# Altium schematic symbol library BIBLIOTECA DE ESQUEMA.SchLib: 404 symbols (part 2 of 2)
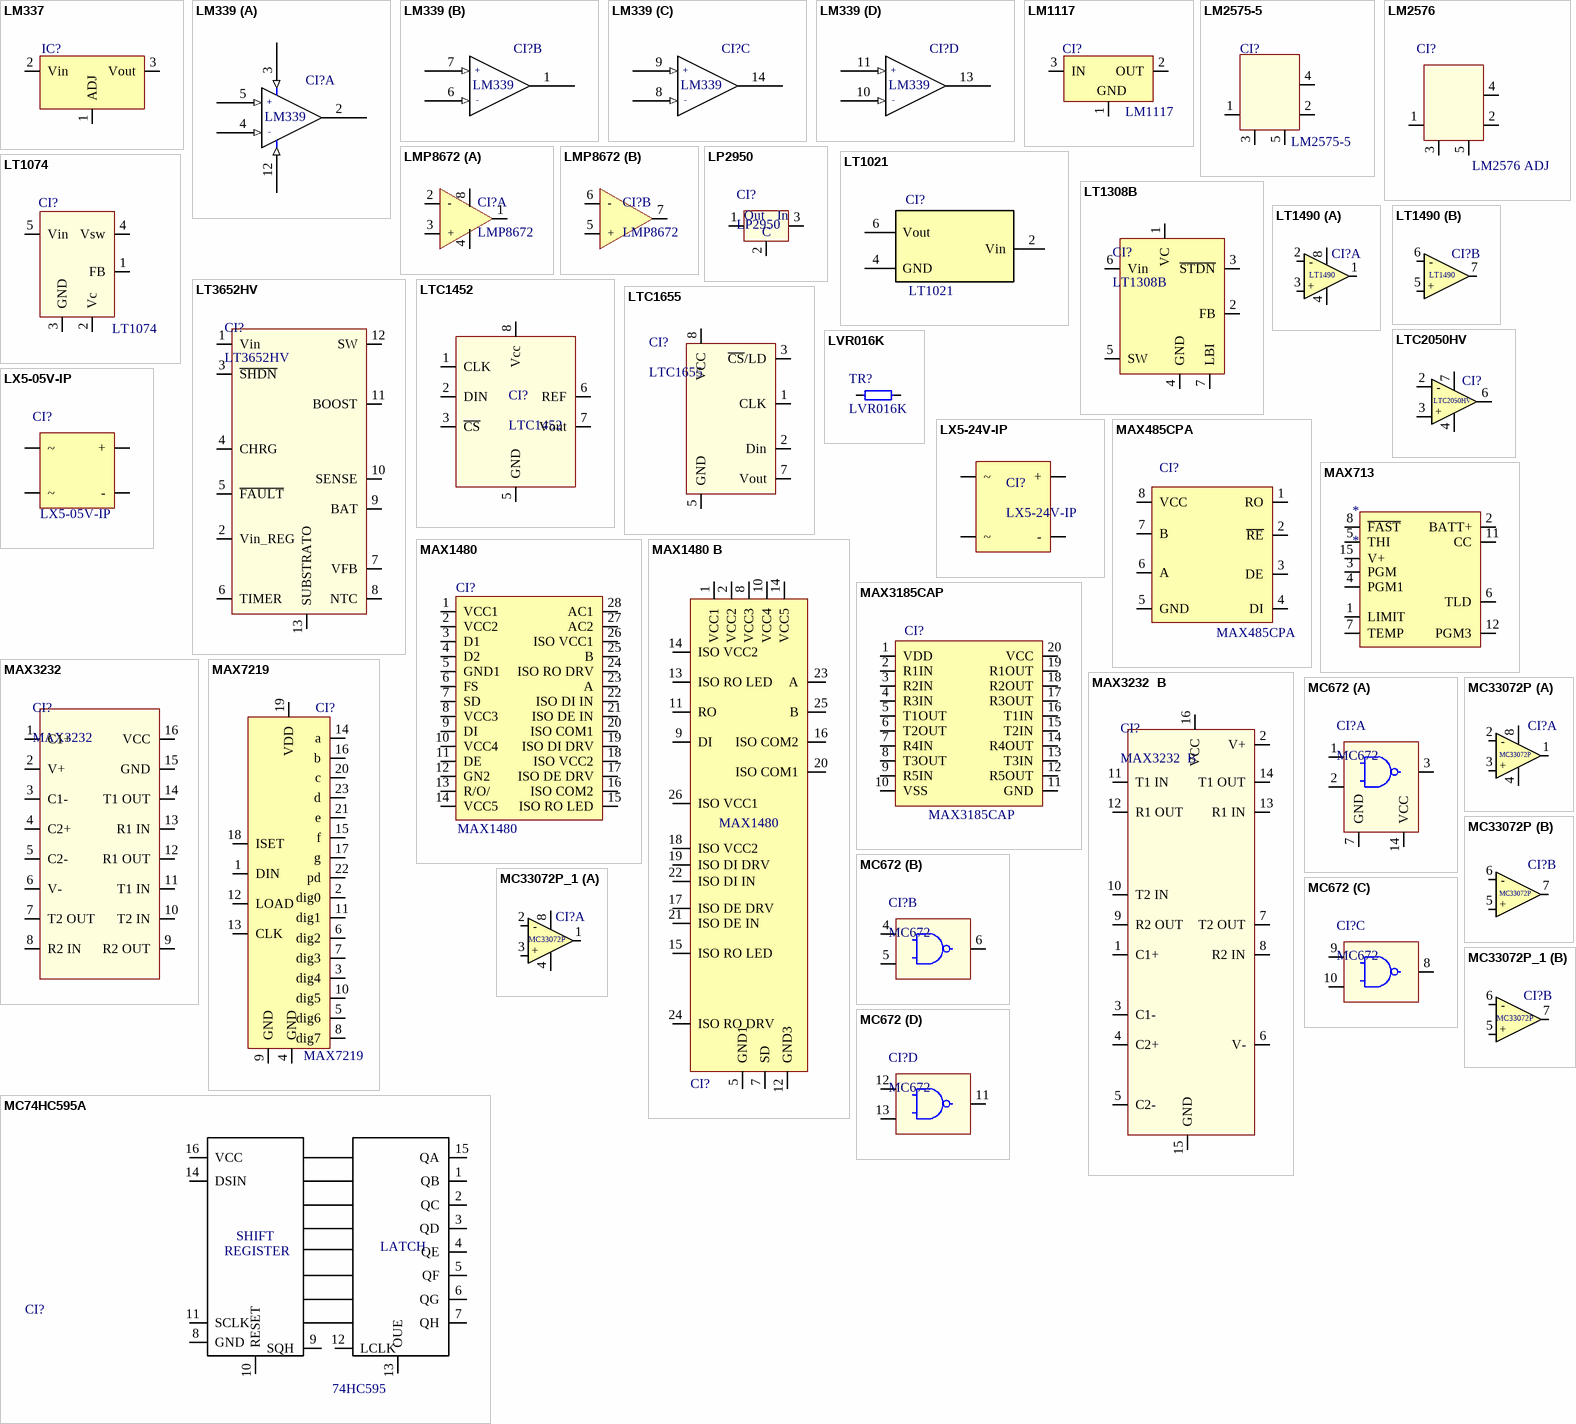
[diagram p22: symbols LM337 to MC33072P_1]

## MAX7219
designator CI?
Driver Display
pins: 1 DIN, 2 dig0, 3 dig4, 4 GND, 5 dig6, 6 dig2, 7 dig3, 8 dig7, 9 GND, 10 dig5, 11 dig1, 12 LOAD, 13 CLK, 14 a, 15 f, 16 b, 17 g, 18 ISET, 19 VDD, 20 c, 21 e, 22 pd, 23 d

## MC74HC595A
designator CI?, comment 74HC595
SHIFTER PARALLEL-OUTPUT
pins: 1 QB, 2 QC, 3 QD, 4 QE, 5 QF, 6 QG, 7 QH, 8 GND, 9 SQH, 10 RESET, 11 SCLK, 12 LCLK, 13 OUE, 14 DSIN, 15 QA, 16 VCC
text: SHIFT; LATCH; REGISTER

## MC672
designator CI?
Porta Nand
footprint DIP14
part A pins: 1, 2, 3, 7 GND, 14 VCC
part B pins: 4, 5, 6
part C pins: 8, 9, 10
part D pins: 11, 12, 13

## MC33072P
designator CI?
AMPLIFICADOR OPERACIONAL
footprint DIP8
footprint SOIC 8
part A pins: 1, 2, 3, 4, 8
part B pins: 5, 6, 7
part A text: -; +
part B text: -; +

## MC33072P_1
designator CI?, comment MC33072P
AMPLIFICADOR OPERACIONAL
footprint DIP8
footprint SOIC 8
part A pins: 1, 2, 3, 4, 8
part B pins: 5, 6, 7
part A text: -; +
part B text: -; +

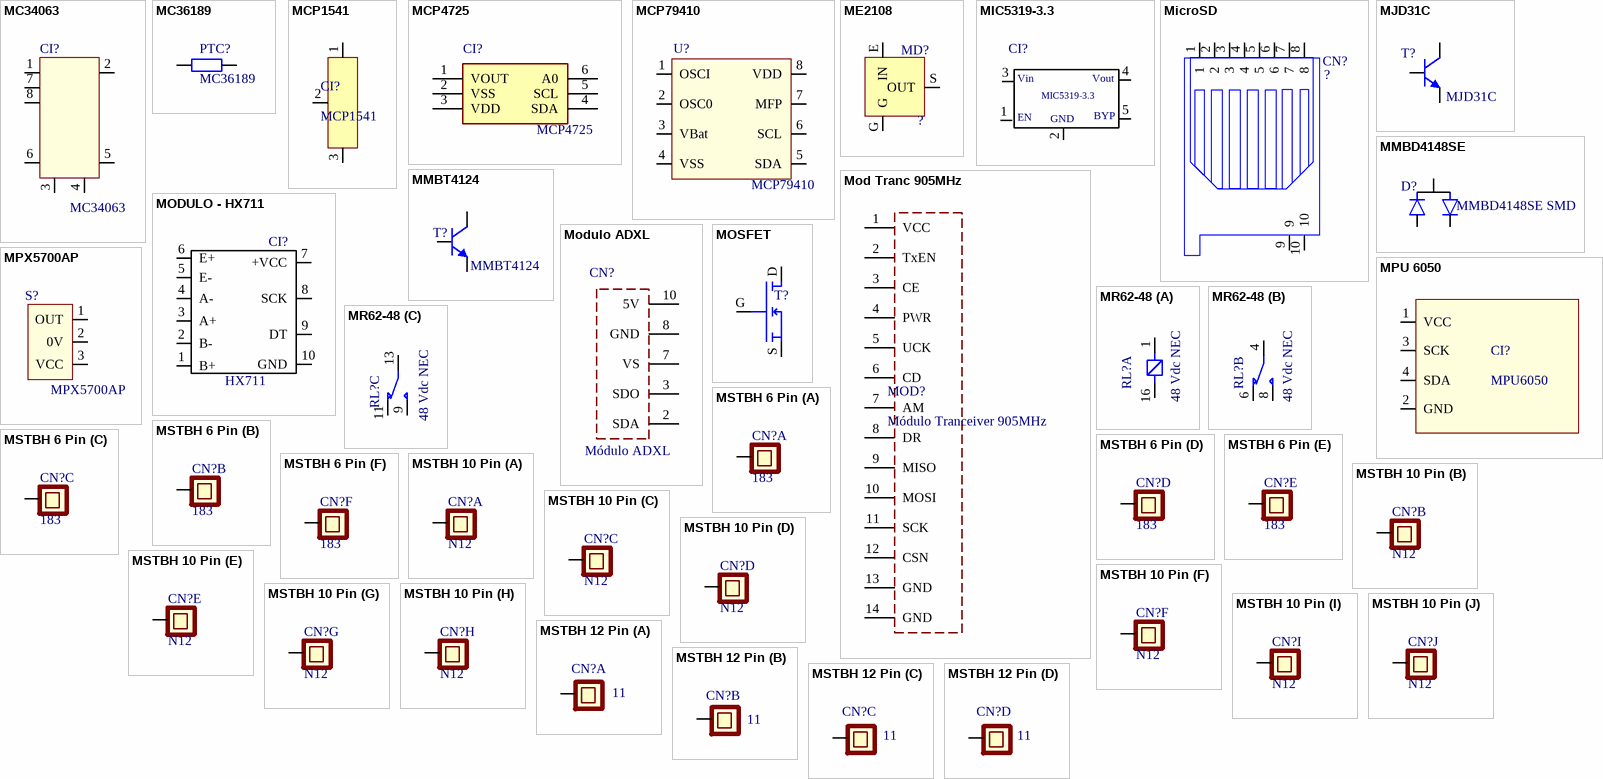
[diagram p16: symbols MC34063 to MSTBH 12 Pin]

## MC34063
designator CI?
Regulador de Tensão Chaveado
footprint DIP8
pins: 1, 2, 3, 4, 5, 6, 7, 8

## MC36189
designator PTC?
FUSÍVEL; Modelo: MC36189
footprint PTC 5.08mm 8mmD
pins: 1, 2

## MCP1541
designator CI?
Fonte de referência de precisão
pins: 1, 2, 3

## MCP4725
designator CI?
pins: 1 VOUT, 2 VSS, 3 VDD, 4 SDA, 5 SCL, 6 A0

## MCP79410
designator U?
Battery-Backed I2C
footprint MSOP-8
pins: 1 OSCI, 2 OSC0, 3 VBat, 4 VSS, 5 SDA, 6 SCL, 7 MFP, 8 VDD

## ME2108
designator MD?, comment ?
Conversor Boost
footprint BoostConverter
pins: E IN, G, S OUT

## MIC5319-3.3
designator CI?
footprint SOT-23 - 5
pins: 1, 2, 3, 4, 5
text: Vin; Vout; BYP; EN; GND

## MicroSD
designator CN?, comment ?
Conector MicroSD
pins: 1, 2, 3, 4, 5, 6, 7, 8, 9, 10

## MJD31C
designator T?
TRANSISTOR NPN; Modelo: PTH; ENCAP: TO-252
footprint TO-252 ( TRAN DPAK)
pins: B, C, E

## MMBD4148SE
designator D?, comment MMBD4148SE SMD
DIODO DE SILICIO; Modelo: MMBD4148SE SMD
footprint SOT-23 (1N4148SMD/MMBD4148-TP/1N4148 SE)
pins: 1, 2, 3

## MMBT4124
designator T?
TRANSISTOR NPN; Modelo: PTH
footprint SOT-23 MMBT
pins: B, C, E

## Mod Tranc 905MHz
designator MOD?, comment Módulo Tranceiver 905MHz
Módulo WIFI Tranceiver 905MHz + Barra de 14 pinos Femea
footprint Mod.Tran905MHz
pins: 1 VCC, 2 TxEN, 3 CE, 4 PWR, 5 UCK, 6 CD, 7 AM, 8 DR, 9 MISO, 10 MOSI, 11 SCK, 12 CSN, 13 GND, 14 GND

## MODULO - HX711
designator CI?, comment HX711
footprint MODULO - HX711
pins: 1 B+, 2 B-, 3 A+, 4 A-, 5 E-, 6 E+, 7 +VCC, 8 SCK, 9 DT, 10 GND

## Modulo ADXL
designator CN?, comment Módulo ADXL
Acelerômetro ADXL 345
pins: 2 SDA, 3 SDO, 7 VS, 8 GND, 10 5V

## MOSFET
designator T?
MOSFET
pins: D, G, S

## MPU 6050
designator CI?, comment MPU6050
Acelererômetro digital MPU6050
footprint MPU 6050
pins: 1 VCC, 2 GND, 3 SCK, 4 SDA

## MPX5700AP
designator S?
SENSOR DE PRESSÃO
pins: 1 OUT, 2 0V, 3 VCC

## MR62-48
designator RL?, comment 48 Vdc NEC
RELÉ
footprint AZ820-2C-48DE
part A pins: 1 B1, 16 B2
part B pins: 4 C1, 6 C3, 8 C2
part C pins: 9 C2, 11 C3, 13 C1

## MSTBH 6 Pin
designator CN?, comment 183
CONECTOR
footprint CONE MSTBH 2,5/ 6 GF
part A pins: 1
part B pins: 2
part C pins: 3
part D pins: 4
part E pins: 5
part F pins: 6

## MSTBH 10 Pin
designator CN?, comment N12
CONECTOR
footprint CONE MSTBH 2,5/ 10 GF
part A pins: 1
part B pins: 2
part C pins: 3
part D pins: 4
part E pins: 5
part F pins: 6
part G pins: 7
part H pins: 8
part I pins: 9
part J pins: 10

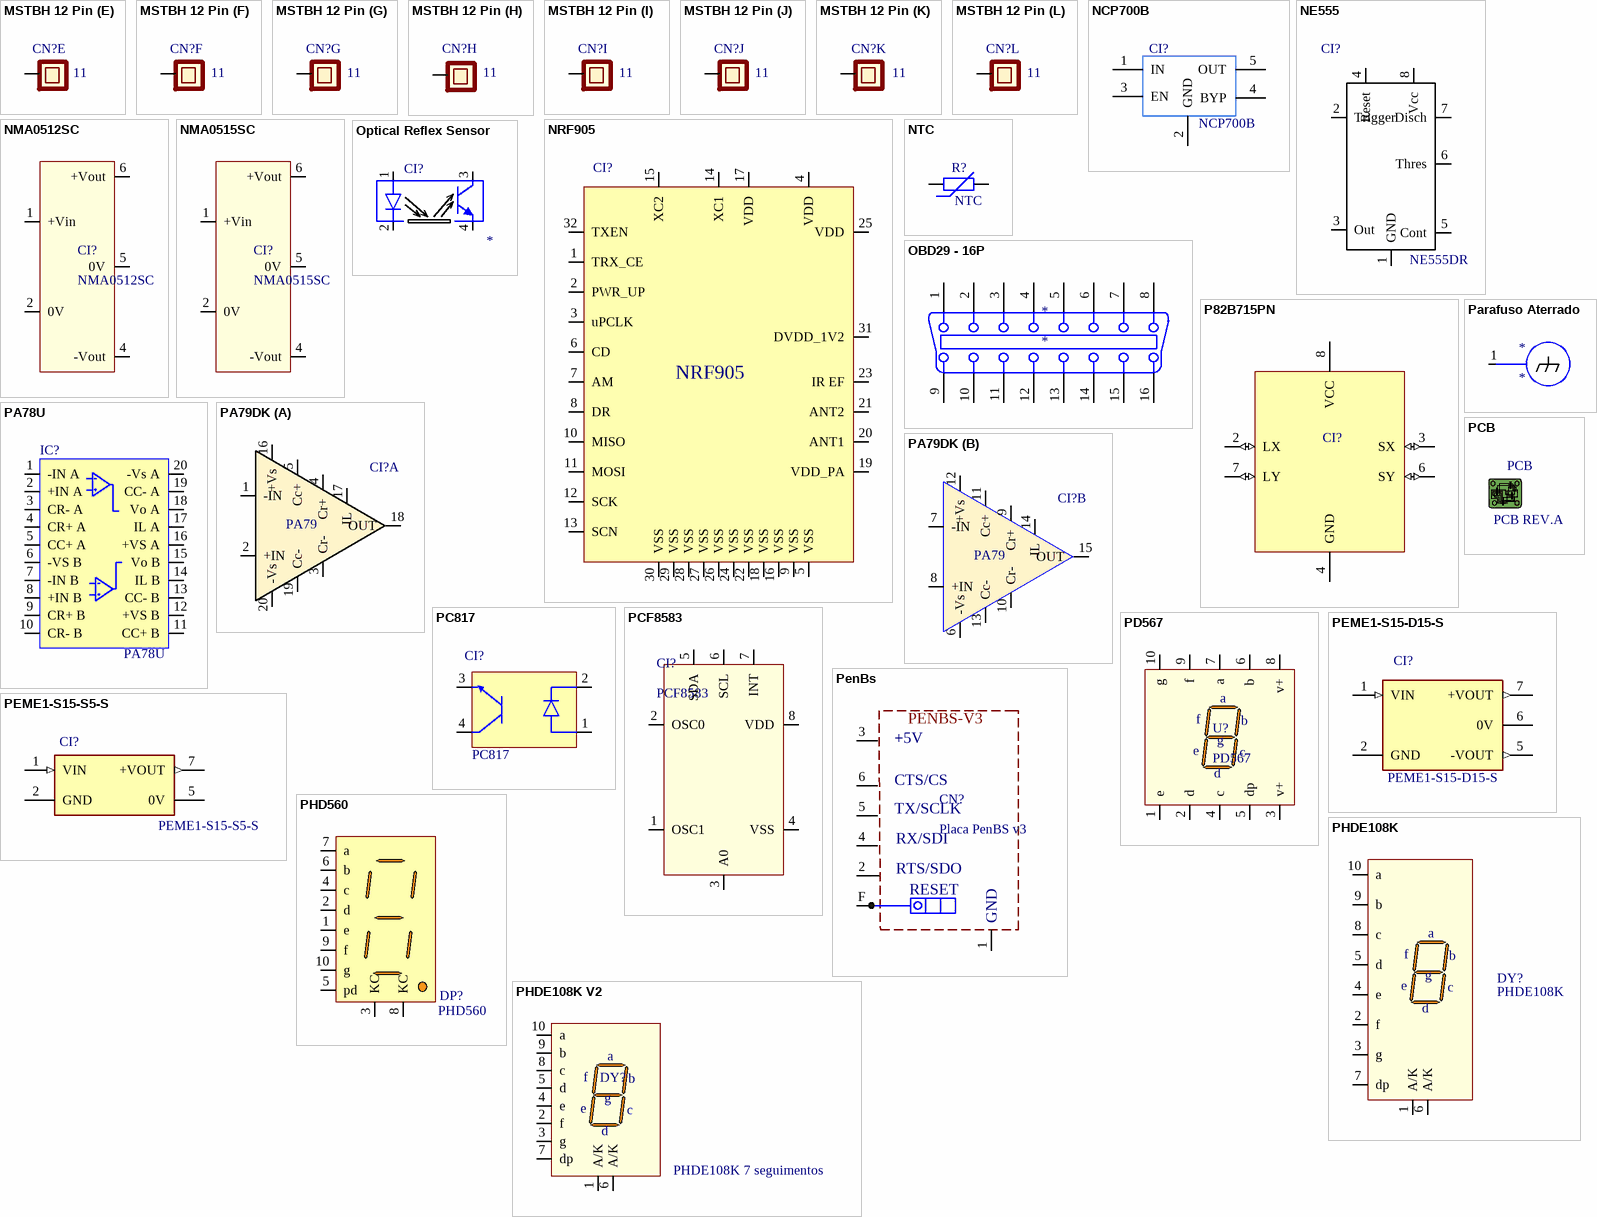
[diagram p17: symbols MSTBH 12 Pin to PHDE108K V2]

## MSTBH 12 Pin
designator CN?, comment 11
CONECTOR
footprint CONE MSTBH 2,5/ 12 GF
part A pins: 1
part B pins: 2
part C pins: 3
part D pins: 4
part E pins: 5
part F pins: 6
part G pins: 7
part H pins: 8
part I pins: 9
part J pins: 10
part K pins: 11
part L pins: 12

## NCP700B
designator CI?
footprint ncp700B
pins: 1 IN, 2 GND, 3 EN, 4 BYP, 5 OUT

## NE555
designator CI?, comment NE555DR
footprint SOIC 8
pins: 1 GND, 2 Trigger, 3 Out, 4 Reset, 5 Cont, 6 Thres, 7 Disch, 8 Vcc

## NMA0512SC
designator CI?
Conversor DC/DC
footprint NMAXXXXSC
pins: 1 +Vin, 2 0V, 4 -Vout, 5 0V, 6 +Vout

## NMA0515SC
designator CI?
Conversor DC/DC
footprint NMA0515SC
pins: 1 +Vin, 2 0V, 4 -Vout, 5 0V, 6 +Vout

## NRF905
designator CI?
TRANSCEPTOR; Modelo: NRF905
footprint QFN32 5X5
pins: 1 TRX_CE, 2 PWR_UP, 3 uPCLK, 4 VDD, 5 VSS, 6 CD, 7 AM, 8 DR, 9 VSS, 10 MISO, 11 MOSI, 12 SCK, 13 SCN, 14 XC1, 15 XC2, 16 VSS, 17 VDD, 18 VSS, 19 VDD_PA, 20 ANT1, 21 ANT2, 22 VSS, 23 IR EF, 24 VSS, 25 VDD, 26 VSS, 27 VSS, 28 VSS, 29 VSS, 30 VSS, 31 DVDD_1V2, 32 TXEN

## NTC
designator R?
RESISTOR VARIAVEL NTC
pins: 1, 2

## OBD29 - 16P
designator *
CONECTOR
pins: 1, 2, 3, 4, 5, 6, 7, 8, 9, 10, 11, 12, 13, 14, 15, 16

## Optical Reflex Sensor
designator CI?
SENSOR DE REFLEXÃO OPTICA
pins: 1, 2, 3, 4

## P82B715PN
designator CI?  (value not drawn)
Extensor p
footprint P82B715PN
pins: 2 LX (io), 3 SX (io), 4 GND, 6 SY (io), 7 LY (io), 8 VCC (power)

## PA78U
designator IC?
REGULADOR DE TENSÃO; Modelo: PA78U
pins: 1 -IN A, 2 +IN A, 3 CR- A, 4 CR+ A, 5 CC+ A, 6 -VS B, 7 -IN B, 8 +IN B, 9 CR+ B, 10 CR- B, 11 CC+ B, 12 +VS B, 13 CC- B, 14 IL B, 15 Vo B, 16 +VS A, 17 IL A, 18 Vo A, 19 CC- A, 20 -Vs A

## PA79DK
designator CI?, comment PA79
REGULADOR DE TENSÃO; Modelo: PA79
part A pins: 1 -IN, 2 +IN, 3 Cr-, 4 Cr+, 5 Cc+, 16 +Vs, 17 IL, 18 OUT, 19 Cc-, 20 -Vs
part B pins: 6 -Vs, 7 -IN, 8 +IN, 9 Cr+, 10 Cr-, 11 Cc+, 12 +Vs, 13 Cc-, 14 IL, 15 OUT

## Parafuso Aterrado
designator *
CONECTOR
footprint Furo GND
pins: 1 M?

## PC817
designator CI?
ACOPLADOR OPTICO
footprint DIP4
pins: 1, 2, 3, 4

## PCB
designator PCB, comment PCB REV.A
PLACA DE CIRCUITO IMPRESSO; REV: A

## PCF8583
designator CI?
Clock/Calendar
footprint DIP8
pins: 1 OSC1, 2 OSC0, 3 A0, 4 VSS, 5 SDA, 6 SCL, 7 INT, 8 VDD

## PD567
designator U?
DISPLAY
footprint Display 7 seg
pins: 1 e, 2 d, 3 v+, 4 c, 5 dp, 6 b, 7 a, 8 v+, 9 f, 10 g

## PEME1-S15-D15-S
designator CI?
footprint PEME1-S15-D15-S
pins: 1 VIN (in), 2 GND (power), 5 -VOUT (out), 6 0V, 7 +VOUT (out)

## PEME1-S15-S5-S
designator CI?
DC/DC +15 / 5V
footprint PEME1-S15-S5-S
pins: 1 VIN (in), 2 GND (power), 5 0V, 7 +VOUT (out)

## PenBs
designator CN?, comment Placa PenBS v3
Módulo PenBs
footprint PenBS
pins: 1, 2, 3, 4, 5, 6, F
text: PENBS-V3; +5V; CTS/CS; TX/SCLK; RX/SDI; RTS/SDO; RESET; GND

## PHD560
designator DP?
DISPLAY
pins: 1 e, 2 d, 3 KC, 4 c, 5 pd, 6 b, 7 a, 8 KC, 9 f, 10 g

## PHDE108K
designator DY?
DISPLAY
footprint DISPLAY PHDE108K
pins: 1 A/K, 2 f, 3 g, 4 e, 5 d, 6 A/K, 7 dp, 8 c, 9 b, 10 a

## PHDE108K V2
designator DY?, comment PHDE108K 7 seguimentos
DISPLAY
footprint DISPLAY PHDE108K
pins: 1 A/K, 2 f, 3 g, 4 e, 5 d, 6 A/K, 7 dp, 8 c, 9 b, 10 a

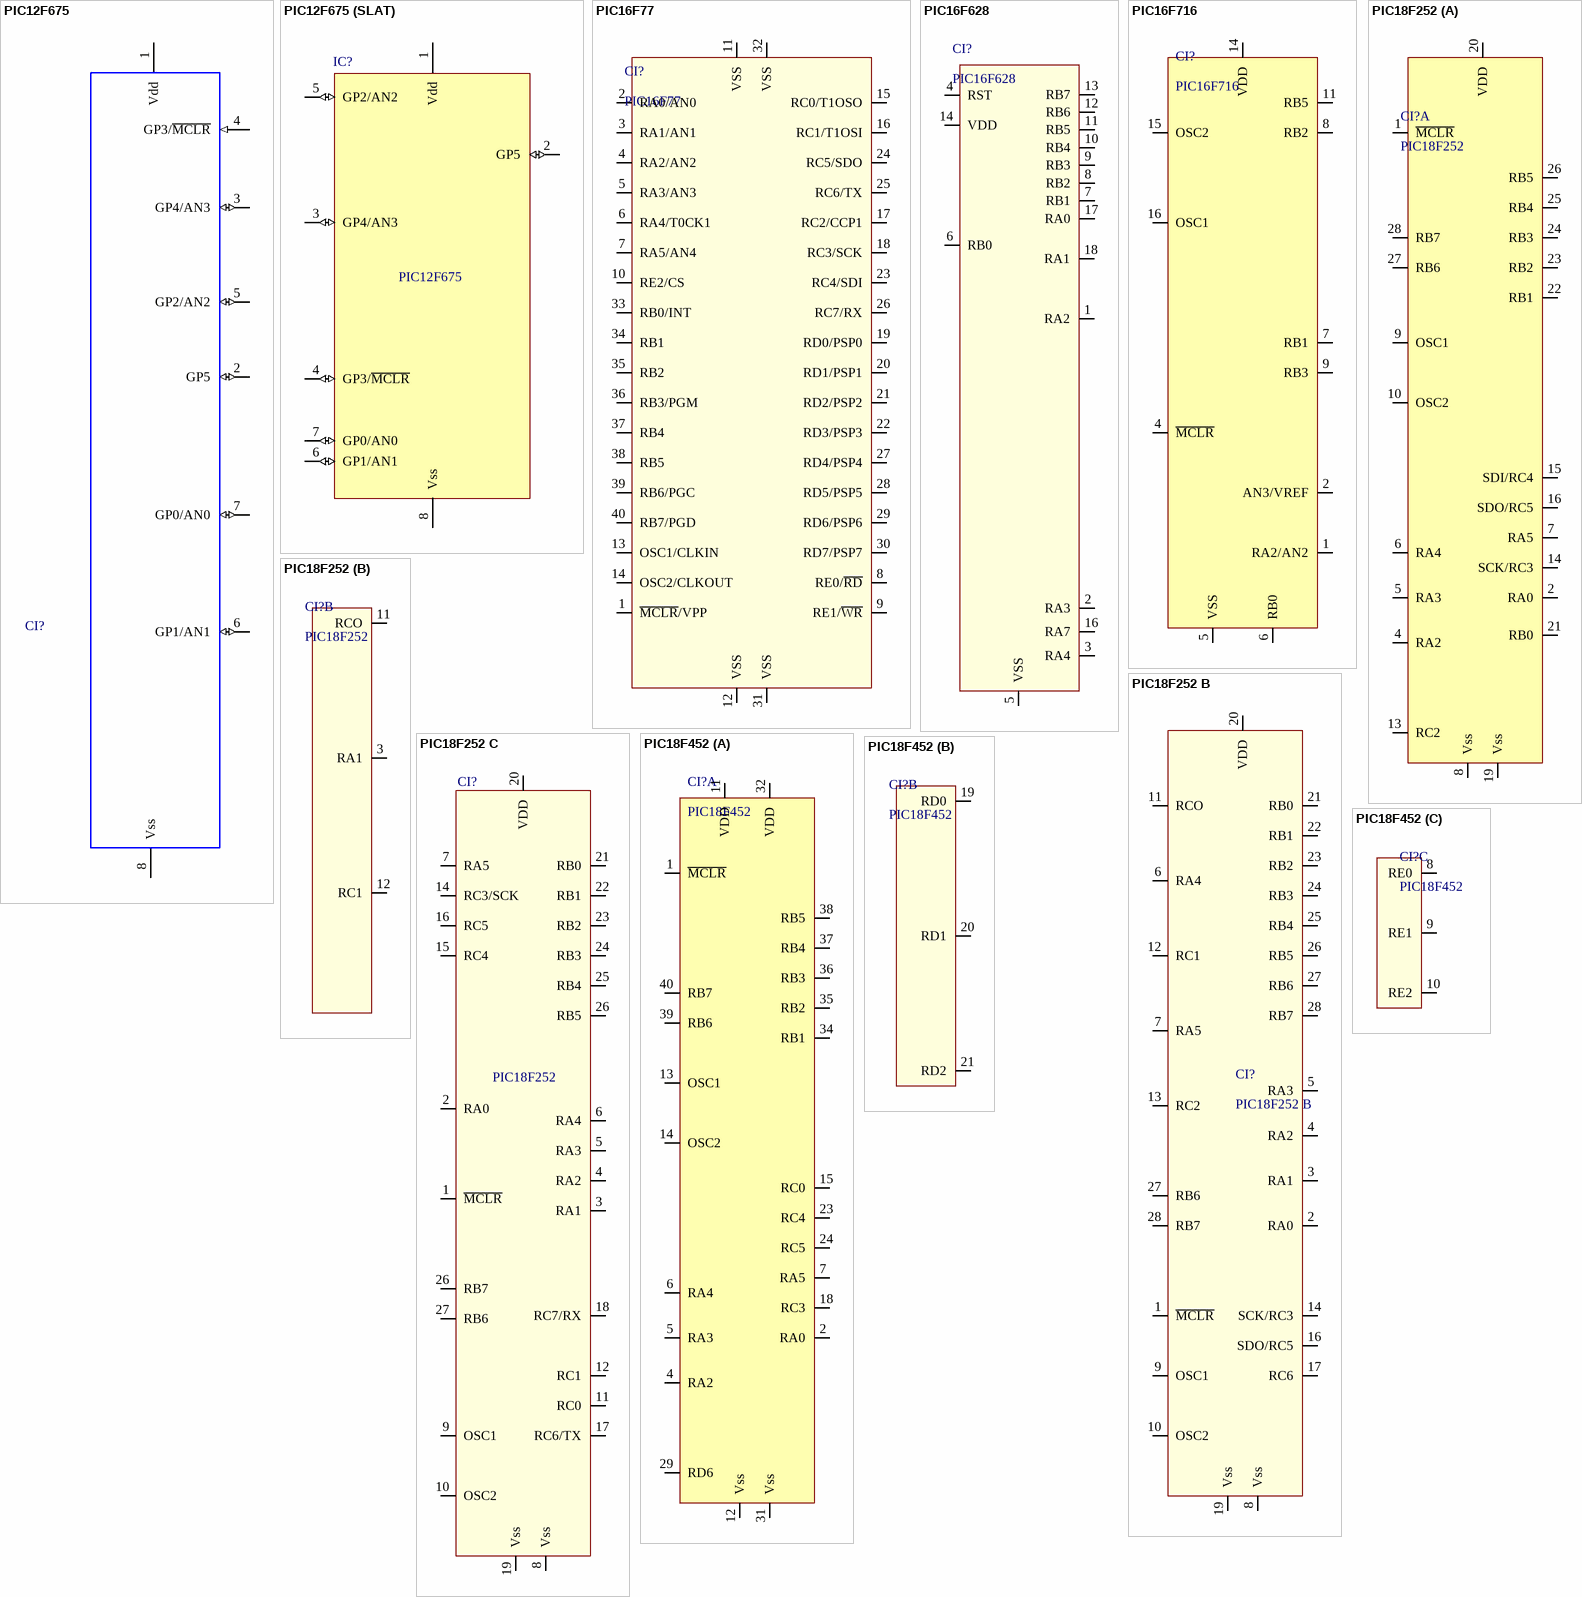
[diagram p18: symbols PIC12F675 to PIC18F452]

## PIC12F675
designator CI?  (value not drawn)
MICROCONTROLADOR; Modelo: PIC12F675
pins: 1 Vdd (power), 2 GP5 (io), 3 GP4/AN3 (io), 4 GP3/~{MCLR} (in), 5 GP2/AN2 (io), 6 GP1/AN1 (io), 7 GP0/AN0 (io), 8 Vss (power)

## PIC12F675 (SLAT)
designator IC?, comment PIC12F675
MICROCONTROLADOR; Modelo: PIC12F675
footprint DIP8
pins: 1 Vdd (power), 2 GP5 (io), 3 GP4/AN3 (io), 4 GP3/~{MCLR} (io), 5 GP2/AN2 (io), 6 GP1/AN1 (io), 7 GP0/AN0 (io), 8 Vss (power)

## PIC16F77
designator CI?
MICROCONTROLADOR
footprint DIP40
pins: 1 ~{MCLR}/VPP, 2 RA0/AN0, 3 RA1/AN1, 4 RA2/AN2, 5 RA3/AN3, 6 RA4/T0CK1, 7 RA5/AN4, 8 RE0/~{RD}, 9 RE1/~{WR}, 10 RE2/CS, 11 VSS, 12 VSS, 13 OSC1/CLKIN, 14 OSC2/CLKOUT, 15 RC0/T1OSO, 16 RC1/T1OSI, 17 RC2/CCP1, 18 RC3/SCK, 19 RD0/PSP0, 20 RD1/PSP1, 21 RD2/PSP2, 22 RD3/PSP3, 23 RC4/SDI, 24 RC5/SDO, 25 RC6/TX, 26 RC7/RX, 27 RD4/PSP4, 28 RD5/PSP5, 29 RD6/PSP6, 30 RD7/PSP7, 31 VSS, 32 VSS, 33 RB0/INT, 34 RB1, 35 RB2, 36 RB3/PGM, 37 RB4, 38 RB5, 39 RB6/PGC, 40 RB7/PGD

## PIC16F628
designator CI?
MICROCONTROLADOR
footprint DIP18
pins: 1 RA2, 2 RA3, 3 RA4, 4 RST, 5 VSS, 6 RB0, 7 RB1, 8 RB2, 9 RB3, 10 RB4, 11 RB5, 12 RB6, 13 RB7, 14 VDD, 16 RA7, 17 RA0, 18 RA1

## PIC16F716
designator CI?
MICROCONTROLADOR; Modelo: PIC16F716
footprint DIP18
pins: 1 RA2/AN2, 2 AN3/VREF, 4 ~{MCLR}, 5 VSS, 6 RB0, 7 RB1, 8 RB2, 9 RB3, 11 RB5, 14 VDD, 15 OSC2, 16 OSC1

## PIC18F252
designator CI?
MICROCONTROLADOR
footprint DIP28-300
part A pins: 1 ~{MCLR}, 2 RA0, 4 RA2, 5 RA3, 6 RA4, 7 RA5, 8 Vss, 9 OSC1, 10 OSC2, 13 RC2, 14 SCK/RC3, 15 SDI/RC4, 16 SDO/RC5, 19 Vss, 20 VDD, 21 RB0, 22 RB1, 23 RB2, 24 RB3, 25 RB4, 26 RB5, 27 RB6, 28 RB7
part B pins: 3 RA1, 11 RCO, 12 RC1

## PIC18F252 B
designator CI?
MICROCONTROLADOR
footprint DIP28-300
pins: 1 ~{MCLR}, 2 RA0, 3 RA1, 4 RA2, 5 RA3, 6 RA4, 7 RA5, 8 Vss, 9 OSC1, 10 OSC2, 11 RCO, 12 RC1, 13 RC2, 14 SCK/RC3, 16 SDO/RC5, 17 RC6, 19 Vss, 20 VDD, 21 RB0, 22 RB1, 23 RB2, 24 RB3, 25 RB4, 26 RB5, 27 RB6, 27 RB6, 28 RB7, 28 RB7

## PIC18F252 C
designator CI?, comment PIC18F252
MICROCONTROLADOR
pins: 1 ~{MCLR}, 2 RA0, 3 RA1, 4 RA2, 5 RA3, 6 RA4, 7 RA5, 8 Vss, 9 OSC1, 10 OSC2, 11 RC0, 12 RC1, 14 RC3/SCK, 15 RC4, 16 RC5, 17 RC6/TX, 18 RC7/RX, 19 Vss, 20 VDD, 21 RB0, 22 RB1, 23 RB2, 24 RB3, 25 RB4, 26 RB5, 26 RB7, 27 RB6

## PIC18F452
designator CI?
MICROCONTROLADOR
footprint DIP40
part A pins: 1 ~{MCLR}, 2 RA0, 4 RA2, 5 RA3, 6 RA4, 7 RA5, 11 VDD, 12 Vss, 13 OSC1, 14 OSC2, 15 RC0, 18 RC3, 23 RC4, 24 RC5, 29 RD6, 31 Vss, 32 VDD, 34 RB1, 35 RB2, 36 RB3, 37 RB4, 38 RB5, 39 RB6, 40 RB7
part B pins: 19 RD0, 20 RD1, 21 RD2
part C pins: 8 RE0, 9 RE1, 10 RE2

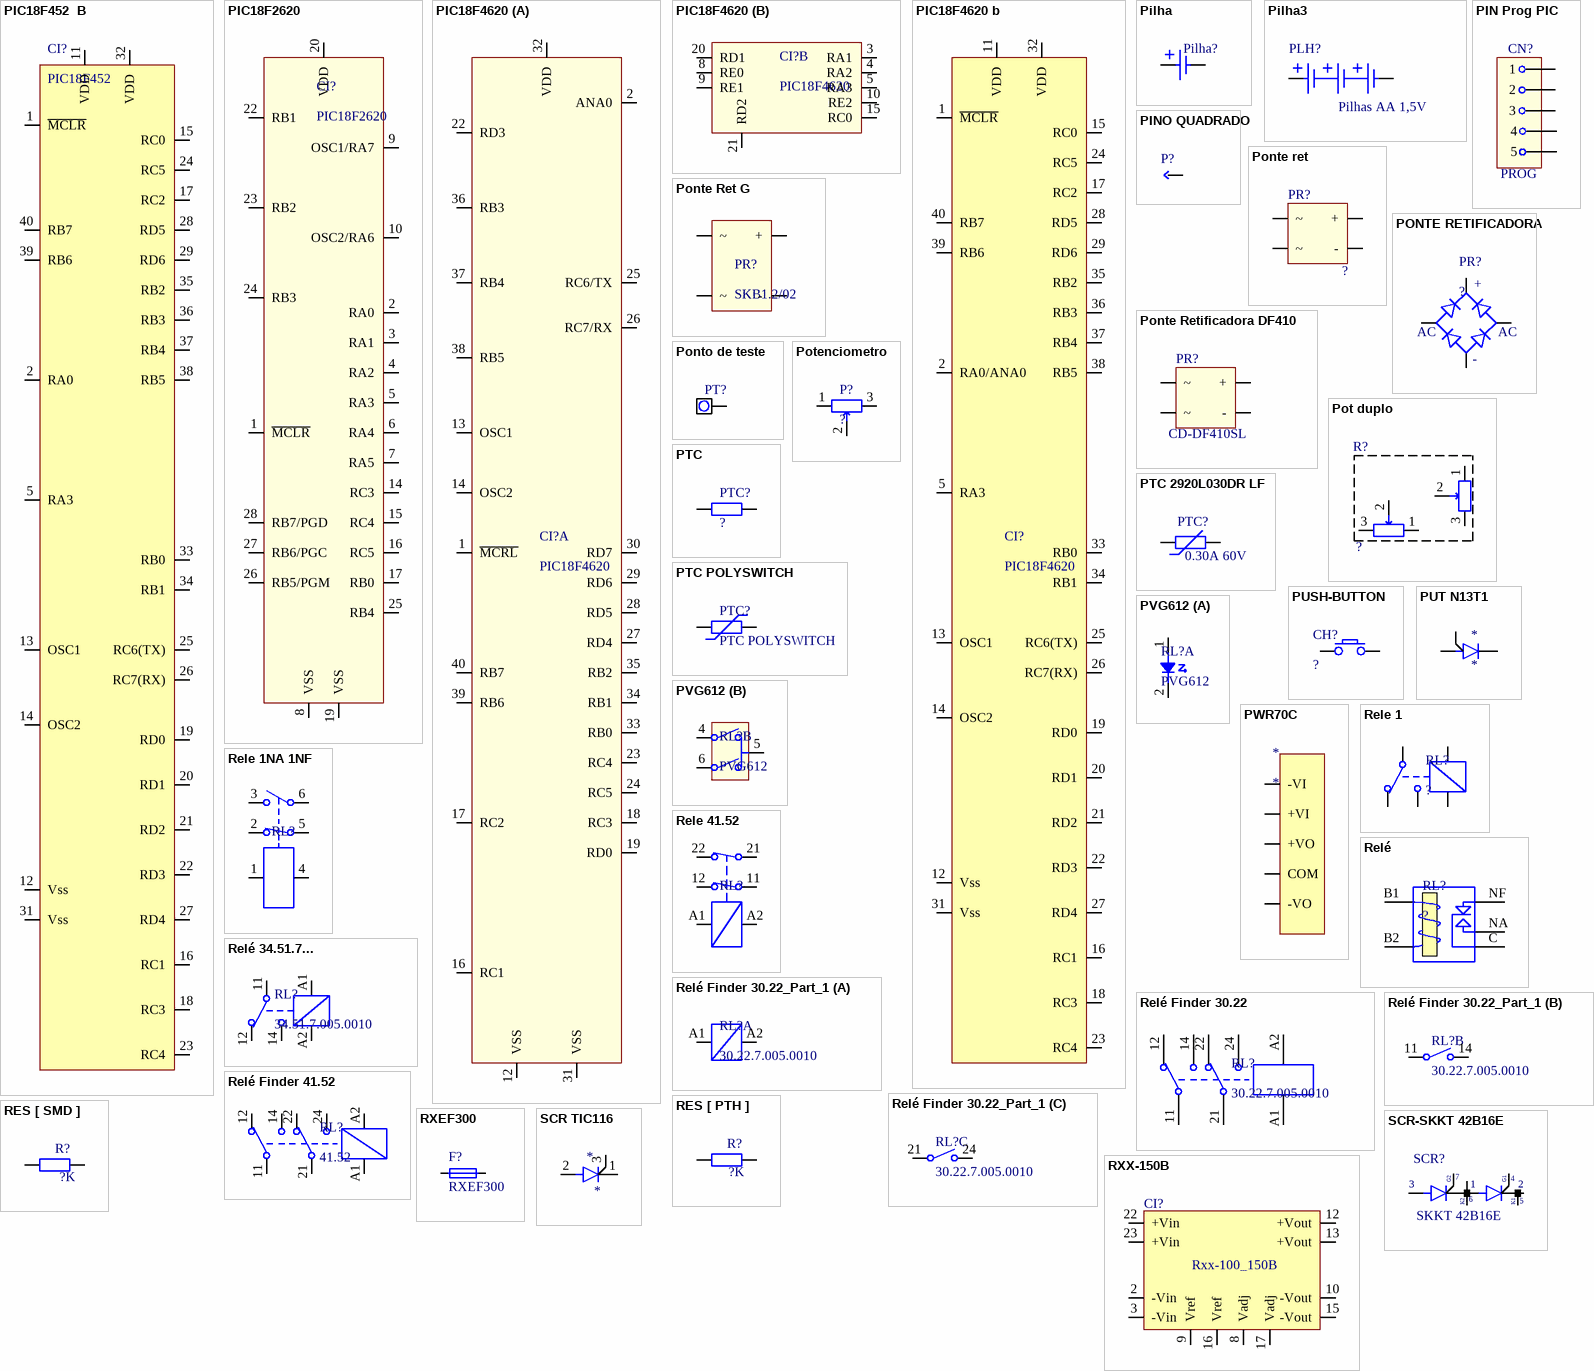
[diagram p19: symbols PIC18F452  B to SCR-SKKT 42B16E]

## PIC18F452  B
designator CI?, comment PIC18F452
MICROCONTROLADOR
footprint DIP40
pins: 1 ~{MCLR}, 2 RA0, 5 RA3, 11 VDD, 12 Vss, 13 OSC1, 14 OSC2, 15 RC0, 16 RC1, 17 RC2, 18 RC3, 19 RD0, 20 RD1, 21 RD2, 22 RD3, 23 RC4, 24 RC5, 25 RC6(TX), 26 RC7(RX), 27 RD4, 28 RD5, 29 RD6, 31 Vss, 32 VDD, 33 RB0, 34 RB1, 35 RB2, 36 RB3, 37 RB4, 38 RB5, 39 RB6, 40 RB7

## PIC18F2620
designator CI?
MICROCONTROLADOR
footprint DIP28-600
pins: 1 ~{MCLR}, 2 RA0, 3 RA1, 4 RA2, 5 RA3, 6 RA4, 7 RA5, 8 VSS, 9 OSC1/RA7, 10 OSC2/RA6, 14 RC3, 15 RC4, 16 RC5, 17 RB0, 19 VSS, 20 VDD, 22 RB1, 23 RB2, 24 RB3, 25 RB4, 26 RB5/PGM, 27 RB6/PGC, 28 RB7/PGD

## PIC18F4620
designator CI?
MICROCONTROLADOR
footprint DIP40
part A pins: 1 ~{MCRL}, 2 ANA0, 12 VSS, 13 OSC1, 14 OSC2, 16 RC1, 17 RC2, 18 RC3, 19 RD0, 22 RD3, 23 RC4, 24 RC5, 25 RC6/TX, 26 RC7/RX, 27 RD4, 28 RD5, 29 RD6, 30 RD7, 31 VSS, 32 VDD, 33 RB0, 34 RB1, 35 RB2, 36 RB3, 37 RB4, 38 RB5, 39 RB6, 40 RB7
part B pins: 3 RA1, 4 RA2, 5 RA3, 8 RE0, 9 RE1, 10 RE2, 15 RC0, 20 RD1, 21 RD2
1 alternate drawing of the same symbol

## PIC18F4620 b
designator CI?, comment PIC18F4620
MICROCONTROLADOR
footprint DIP40
pins: 1 ~{MCLR}, 2 RA0/ANA0, 5 RA3, 11 VDD, 12 Vss, 13 OSC1, 14 OSC2, 15 RC0, 16 RC1, 17 RC2, 18 RC3, 19 RD0, 20 RD1, 21 RD2, 22 RD3, 23 RC4, 24 RC5, 25 RC6(TX), 26 RC7(RX), 27 RD4, 28 RD5, 29 RD6, 31 Vss, 32 VDD, 33 RB0, 34 RB1, 35 RB2, 36 RB3, 37 RB4, 38 RB5, 39 RB6, 40 RB7

## Pilha
designator Pilha?  (value not drawn)
Pilha
pins: 1 +, 2 -

## Pilha3
designator PLH?, comment Pilhas AA 1,5V
AJUDA
pins: 1 +, 2 -

## PIN Prog PIC
designator CN?, comment PROG
CONECTOR
pins: 1, 2, 3, 4, 5

## PINO QUADRADO
designator P?  (value not drawn)
CONECTOR
footprint PINO QUADRADO
pins: 1 P

## Ponte ret
designator PR?, comment ?
Ponte Retificadora
footprint PONTE_RET_1
pins: 1 +, 2 -, 3 ~, 4 ~

## Ponte Ret G
designator PR?, comment SKB1.2/02
Ponte Retificadora
footprint PONTE_RET_1
pins: 1 +, 2 -, 3 ~, 4 ~

## PONTE RETIFICADORA
designator PR?, comment ?
Ponte Retificadora
footprint PONTE_RET_1
pins: 1, 2, 3, 4
text: +; AC; -

## Ponte Retificadora DF410
designator PR?, comment CD-DF410SL
Ponte Retificadora
footprint PONTE_RET_CD_DF410
pins: +, -, F1 ~, F2 ~

## Ponto de teste
designator PT?  (value not drawn)
Ponto de teste
pins: 1

## Pot duplo
designator R?, comment ?
AJUDA
pins: 1, 1, 2, 2, 3, 3

## Potenciometro
designator P?, comment ?
Potenciometro
pins: 1, 2, 3

## PTC
designator PTC?, comment ?
FUSÍVEL
pins: 1, 2

## PTC 2920L030DR LF
designator PTC?, comment 0.30A 60V
Fusíveis rearmáveis; Codigo: 576-2920L030; Modelo: SMD 2920
footprint PTC 2920L030DR LF
pins: 1, 2

## PTC POLYSWITCH
designator PTC?
RESISTOR PTC POLYSWITCH
pins: 1, 2

## PUSH-BUTTON
designator CH?, comment ?
Chave ?
pins: 1, 2

## PUT N13T1
designator *
pins: 1 ANODO, 2 GATE, 3 CATODO

## PVG612
designator RL?
RELÉ ELETRÔNICO
footprint DIP6
part A pins: 1 +VF1, 2 +VF2
part B pins: 4, 5, 6

## PWR70C
designator *
AJUDA
pins: +VI, +VO, -VI, -VO, COM

## Rele 1
designator RL?, comment ?
RELÉ
footprint RELE SIMP (RELE METALTEX 24V)
pins: A1, A2, C, NA 14, NF

## Rele 1NA 1NF
designator RL?, comment Relé  (value not drawn)
pins: 1, 2, 3, 4, 5, 6

## Rele 41.52
designator RL?, comment 41.52.?  (value not drawn)
RELÉ FINDER
footprint RELE_FIND 41.52/41.61
pins: 11, 12, 21, 22, A1, A2

## Relé
designator RL?, comment ?
RELÉ
pins: B1, B2, C, NA, NF

## Relé 34.51.7...
designator RL?, comment 34.51.7.005.0010
RELÉ FINDER
footprint Rele 34.51
pins: 11, 12, 14, A1, A2

## Relé Finder 30.22
designator RL?, comment 30.22.7.005.0010
RELÉ FINDER
footprint RELE 30.22 FINDER
pins: 11, 12, 14, 21, 22, 24, A1, A2

## Relé Finder 30.22_Part_1
designator RL?, comment 30.22.7.005.0010
RELÉ FINDER
footprint RELE 30.22 FINDER
part A pins: A1, A2
part B pins: 11, 14
part C pins: 21, 24

## Relé Finder 41.52
designator RL?, comment 41.52
RELÉ FINDER
footprint RELE_FIND 41.52/41.61
pins: 11, 12, 14, 21, 22, 24, A1, A2

## RES [ PTH ]
designator R?, comment value ?K  (hidden comment: ?K - ?W - ?%)
RESISTOR DE METAL FILME                                                                                   RESISTOR DE FIO ENROLADO                                                                                    RESISTOR PR03                                                                                               RESISTOR PR02                                                                                                    RESISTOR PR01; Modelo: PTH *; Tipo: Resistor Metal Filme; Resistor Fio enrolado; Tolerancia: ?%; Potência: ?W; Codigo: *; ENCAP: *
footprint RES 44mm D8 (Resistor Fio)
footprint RES 27mm D6.5
footprint RES 19mm D6.5
footprint RES 18MM D3
footprint RES 17.5MM D6.5
footprint RES 17.5MM D6.5
footprint RES 17.5MM D3.8 (RN65E)
footprint RES 16mm D2.5
footprint RES 9mm D2.5
footprint RES 8.5mm D2.5
footprint RES 6mm D2.5
footprint RES 5mm D2.5
footprint RES 4mm D3 Vertical
footprint RES 4mm D3
pins: 1, 2

## RES [ SMD ]
designator R?, comment value ?K  (hidden comment: ?K - ?W - ?%)
RESISTOR DE METAL FILME                                                                                   RESISTOR DE FIO ENROLADO                                                                                    RESISTOR PR03                                                                                               RESISTOR PR02                                                                                                    RESISTOR PR01; Modelo: SMD *; Tolerancia: ?%; Potência: ?W; Codigo: *; ENCAP: *
footprint RES 2512 [ 6432 ]
footprint RES 1206
footprint RES 0805
pins: 1, 2

## RXEF300
designator F?
FUSÍVEL
footprint VDR 5mm entre pads
pins: 1, 2

## RXX-150B
designator CI?, comment Rxx-100_150B
Conversor DC/DC
footprint RXX-150B (Conversor DC/DC)
pins: 2 -Vin, 3 -Vin, 8 Vadj, 9 Vref, 10 -Vout, 12 +Vout, 13 +Vout, 15 -Vout, 16 Vref, 17 Vadj, 22 +Vin, 23 +Vin

## SCR TIC116
designator *
pins: 1 CATODO, 2 ANODO, 3 GATE

## SCR-SKKT 42B16E
designator SCR?, comment SKKT 42B16E
SCR
pins: 1, 2, 3, 4, 6, 6, 7
text: G2; G1; K2; K1; 5

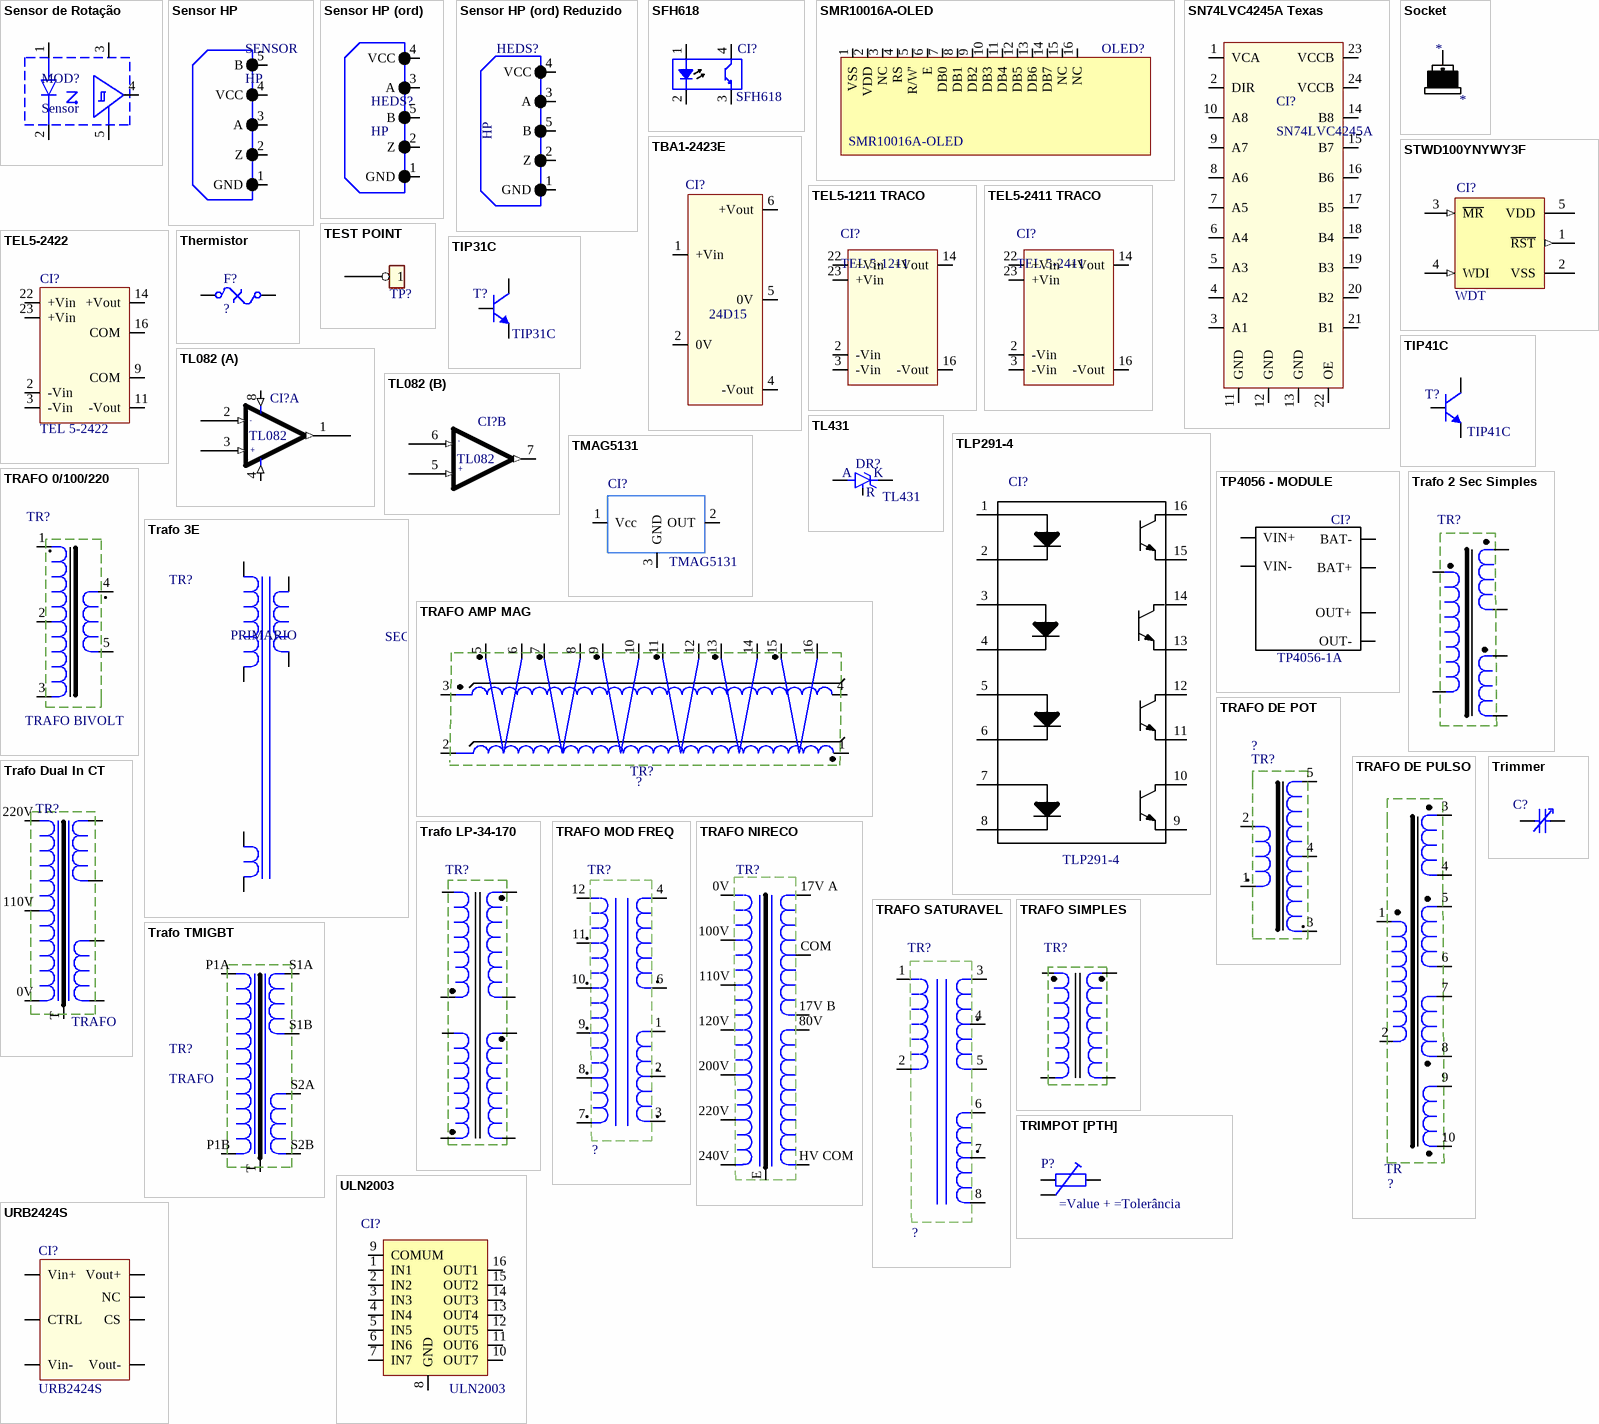
[diagram p20: symbols Sensor de Rotação to URB2424S]

## Sensor de Rotação
designator MOD?, comment Sensor
Módulo Di-elétrons Sensor de Rotação
footprint Sensor de Rotação
pins: 1 A, 2 K, 3 A, 4 A, 5 A

## Sensor HP
designator SENSOR, comment HP
SENSOR HP
pins: 1 GND, 2 Z, 3 A, 4 VCC, 5 B

## Sensor HP (ord)
designator HEDS?, comment HP
AJUDA
pins: 1 GND, 2 Z, 3 A, 4 VCC, 5 B

## Sensor HP (ord) Reduzido
designator HEDS?, comment HP
AJUDA
footprint SENSOR HP FIO Reduzido 2
pins: 1 GND, 2 Z, 3 A, 4 VCC, 5 B

## SFH618
designator CI?
ACOPLADOR OPTICO
footprint DIP4
pins: 1 A "Anode", 2 K "Cathode", 3 E "Emitter", 4 C "Collector"

## SMR10016A-OLED
designator OLED?, comment SMR10016A - OLED  (value not drawn)
DISPLAY; Modelo: SMR10016A - OLED
pins: 1 VSS, 2 VDD, 3 NC, 4 RS, 5 R/W', 6 E, 7 DB0, 8 DB1, 9 DB2, 10 DB3, 11 DB4, 12 DB5, 13 DB6, 14 DB7, 15 NC, 16 NC

## SN74LVC4245A Texas
designator CI?, comment SN74LVC4245A
Octal Bus Transceiver and 3.3V to 5V Shifter
footprint DW 24P
pins: 1 VCA, 2 DIR, 3 A1, 4 A2, 5 A3, 6 A4, 7 A5, 8 A6, 9 A7, 10 A8, 11 GND, 12 GND, 13 GND, 14 B8, 15 B7, 16 B6, 17 B5, 18 B4, 19 B3, 20 B2, 21 B1, 22 OE, 23 VCCB, 24 VCCB

## Socket
designator *
AJUDA
pins: 1

## STWD100YNYWY3F
designator CI?, comment WDT
footprint SOT-23-OT5_M
pins: 1 ~{RST} (out), 2 VSS (power), 3 ~{MR} (in), 4 WDI (in), 5 VDD (power)

## TBA1-2423E
designator CI?, comment 24D15
Conversor DC/DC
footprint NMA0515SC
pins: 1 +Vin, 2 0V, 4 -Vout, 5 0V, 6 +Vout

## TEL5-1211 TRACO
designator CI?, comment TEL 5-1211
Conversor DC/DC Traco Power 12 para 5V/1000mA
footprint TEL 5-XXXX SINGLE
pins: 2 -Vin, 3 -Vin, 14 +Vout, 16 -Vout, 22 +Vin, 23 +Vin

## TEL5-2411 TRACO
designator CI?, comment TEL 5-2411
Conversor DC/DC Traco Power 24 para 5V/1000mA
footprint Traco TEL 5-2411
pins: 2 -Vin, 3 -Vin, 14 +Vout, 16 -Vout, 22 +Vin, 23 +Vin

## TEL5-2422
designator CI?, comment TEL 5-2422
Conversor DC/DC Traco Power 18-36 para +12/-12VCC 250mA
footprint Traco TEL 5-2411
pins: 2 -Vin, 3 -Vin, 9 COM, 11 -Vout, 14 +Vout, 16 COM, 22 +Vin, 23 +Vin

## TEST POINT
designator TP?  (value not drawn)
CONECTOR
footprint Pino Fasto
pins: 1

## Thermistor
designator F?, comment ?
FUSÍVEL
pins: 1, 2

## TIP31C
designator T?
TRANSISTOR NPN; Modelo: PTH
footprint TO-220-3 Deit
pins: 1 B, 2 C, 3 E

## TIP41C
designator T?
TRANSISTOR NPN; Modelo: PTH
footprint TO-220J
pins: 1 B, 2 C, 3 E

## TL082
designator CI?
AMPLIFICADOR OPERECIONAL; Modelo: TL082
footprint DIP8
part A pins: 1 OUTPUT (out), 2 PLUS INPUT (in), 3 MINUS INPUT (in), 4 GROUND (in), 8 POWER (in)
part B pins: 5 MINUS INPUT (in), 6 PLUS INPUT (in), 7 OUTPUT (out)
part A text: -; +
part B text: -; +

## TL431
designator DR?
DIODO REGULADOR PROGRAMÁVEL
footprint SOIC 8 TL431
pins: 1 R, 2 A, 3 K

## TLP291-4
designator CI?
pins: 1, 2, 3, 4, 5, 6, 7, 8, 9, 10, 11, 12, 13, 14, 15 17, 16

## TMAG5131
designator CI?
pins: 1 Vcc, 2 OUT, 3 GND

## TP4056 - MODULE
designator CI?, comment TP4056-1A
footprint Modulo - TP4056
pins: B+ BAT+, B- BAT-, OUT+, OUT-, V+ VIN+, V- VIN-

## TRAFO 0/100/220
designator TR?, comment TRAFO BIVOLT
pins: 1 VM, 2 AM, 3 PT, 4 CZ, 5 MR

## Trafo 2 Sec Simples
designator TR?, comment ?  (value not drawn)
TRANSFORMADOR
pins: 1 PR-1, 2 SEC1-1, 3 SEC2-1, 4 SEC2-2, 5 SEC1-2, 6 PR-2

## Trafo 3E
designator TR?, comment ?  (value not drawn)
TRANSFORMADOR
pins: 1 AC, 2 AC, 3 AC, 4 AC, 5 AC, 6 AC
text: PRIMARIO; SECONDARIO

## TRAFO AMP MAG
designator TR?, comment ?
TRANSFORMADOR
pins: 1 BR/LR, 2 BR1, 3 VL2, 4 BR2, 5 VM, 6 BR/VM, 7 AZ, 8 BR/AZ, 9 AM, 10 BR/AM, 11 VD, 12 BR/VD, 13 PT, 14 BR/PT, 15 LR, 16 BR/LR

## TRAFO DE POT
designator TR?, comment ?
TRANSFORMADOR
pins: 1 CZ, 2 MR, 3 VM, 4 LR, 5 AM

## TRAFO DE PULSO
designator TR, comment ?
TRANSFORMADOR
pins: 1 PT, 2 LR, 3 BR/VD, 4 AM, 5 BR/AZ, 6 BR, 7 BR/VT, 8 VM, 9 BR/CZ, 10 MR

## Trafo Dual In CT
designator TR?, comment TRAFO
TRANSFORMADOR
pins: 0V AC, 110V AC, 220V AC, S1A AC, S1B AC, S2A AC, S2B AC, T 5

## Trafo LP-34-170
designator TR?, comment ?  (value not drawn)
TRANSFORMADOR
pins: 1, 2, 3, 4, 5, 6, 7, 8

## TRAFO MOD FREQ
designator TR?, comment ?
TRANSFORMADOR
pins: 1, 2, 3, 4, 6, 7 COM, 8 60V, 9 100V, 10 150V, 11 200V, 12 300V

## TRAFO NIRECO
designator TR?, comment TRAFO  (value not drawn)
TRANSFORMADOR
pins: 0V, 17V A, 17V B, 80V, 100V, 110V, 120V, 200V, 220V, 240V, COM 0V, E, HV COM 0V

## TRAFO SATURAVEL
designator TR?, comment ?
TRANSFORMADOR
pins: 1 PT, 2 PT, 3 AZ, 4 VL, 5 AZ, 6 BR/LR, 7 BR, 8 VM

## TRAFO SIMPLES
designator TR?, comment ?  (value not drawn)
TRANSFORMADOR
pins: 1 PR-1, 2 PR-2, 3 SEC-1, 4 SEC-2

## Trafo TMIGBT
designator TR?, comment TRAFO
TRANSFORMADOR
footprint TMIGBT
pins: P1A AC, P1B AC, S1A AC, S1B AC, S2A AC, S2B AC, T 5

## Trimmer
designator C?, comment ?F ?V  (value not drawn)
TRIMMER
footprint Trimmer
pins: 1, 2

## TRIMPOT [PTH]
designator P?
POTENCIOMETRO; Value: ?K; Modelo: PTH; Tolerancia: ?%; Modelo: *; Codigo: *
footprint trimpot 3006p
footprint Trimpot 3296W
footprint Trimpot 3299P (5K)
footprint TRIMPOT 3362W
footprint Trimpot 3386F
pins: 1, 2, 3

## ULN2003
designator CI?
Driver de Transistores Darlington.; Modelo: ULN2003
footprint DIP16
pins: 1 IN1, 2 IN2, 3 IN3, 4 IN4, 5 IN5, 6 IN6, 7 IN7, 8 GND, 9 COMUM, 10 OUT7, 11 OUT6, 12 OUT5, 13 OUT4, 14 OUT3, 15 OUT2, 16 OUT1

## URB2424S
designator CI?
CONVERSOR DC-DC; Modelo: URB2424S
pins: 1 Vin-, 2 Vin+, 3 CTRL, 5 NC, 6 Vout+, 7 Vout-, 8 CS

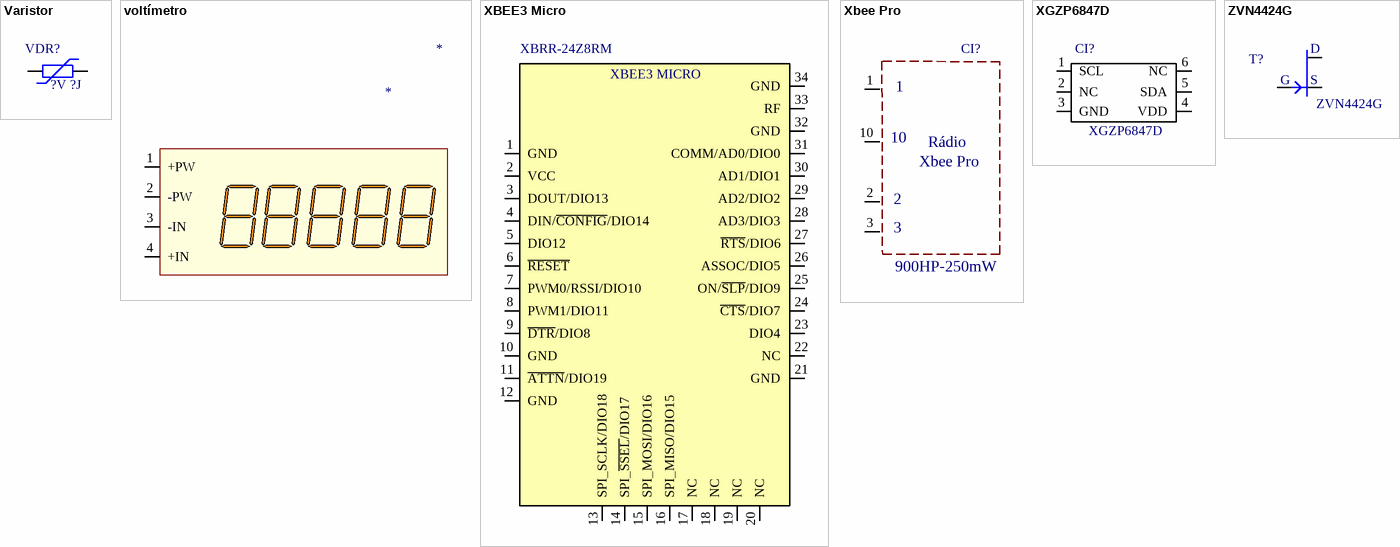
[diagram p21: symbols Varistor to ZVN4424G]

## Varistor
designator VDR?, comment ?V ?J
VARISTOR
pins: 1, 2

## voltímetro
designator *
VOLTIMETRO
pins: 1 +PW, 2 -PW, 3 -IN, 4 +IN

## XBEE3 Micro
designator XBRR-24Z8RM, comment XBEE3 MICRO
MICROCONTROLADOR; Modelo: SMD
footprint Xbee Pro - XBRR
pins: 1 GND, 2 VCC, 3 DOUT/DIO13, 4 DIN/~{CONFIG}/DIO14, 5 DIO12, 6 ~{RESET}, 7 PWM0/RSSI/DIO10, 8 PWM1/DIO11, 9 ~{DTR}/DIO8, 10 GND, 11 ~{ATTN}/DIO19, 12 GND, 13 SPI_SCLK/DIO18, 14 SPI_~{SSEL}/DIO17, 15 SPI_MOSI/DIO16, 16 SPI_MISO/DIO15, 17 NC, 18 NC, 19 NC, 20 NC, 21 GND, 22 NC, 23 DIO4, 24 ~{CTS}/DIO7, 25 ON/~{SLP}/DIO9, 26 ASSOC/DIO5, 27 ~{RTS}/DIO6, 28 AD3/DIO3, 29 AD2/DIO2, 30 AD1/DIO1, 31 COMM/AD0/DIO0, 32 GND, 33 RF, 34 GND

## Xbee Pro
designator CI?, comment Rádio Xbee Pro XBP9-DMUT-012  (value not drawn)
MICROCONTROLADOR; Modelo: PTH
footprint Xbee Pro
pins: 1, 2, 3, 10
text: Rádio; 900HP-250mW

## XGZP6847D
designator CI?
footprint XGZP6847D
pins: 1 SCL, 2 NC, 3 GND, 4 VDD, 5 SDA, 6 NC

## ZVN4424G
designator T?
TRANSISTOR MOSFET; Modelo: PTH; ENCAP: SOT-223
footprint Sot 223 ZVN4424G
pins: 1 G, 2 D, 3 S